# Altium integrated library C0805F104K5RACTU.IntLib: 1 symbol
Pins are listed as number, name and electrical type; pins without a type are passive.

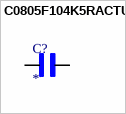
[diagram p0: symbol C0805F104K5RACTU]

## C0805F104K5RACTU
designator C?
0805 C 100nF Ceramic Multilayer Capacitor, 50 VDC, +125degC, X7R Dielec, +/-10% | KEMET C0805F104K5RACTU; SnapEDA_Link: https://www.snapeda.com/parts/C0805F104K5RACTU/KEMET/view-part/?ref=snap; Package: 0805 Kemet; Value: *; MF: KEMET; MP: C0805F104K5RACTU; Check_prices: https://www.snapeda.com/parts/C0805F104K5RACTU/KEMET/view-part/?ref=eda
footprint CAPC2012X88N
pins: 1, 2